# Altium schematic symbol library H_Bridge.SchLib: 2 symbols
Pins are listed as number, name and electrical type; pins without a type are passive.

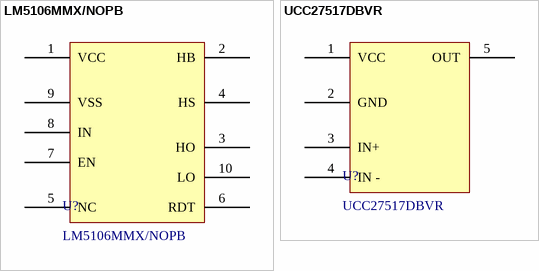
[diagram p0: symbols LM5106MMX/NOPB to UCC27517DBVR]

## LM5106MMX/NOPB
designator U?
Half-Bridge Gate Driver With Programmable Dead-Time; Manufacturer: Texas Instruments; Output Current: 1.8 A; Fall Time: 10 ns; Number of Drivers: 2 Driver; Number of Outputs: 2 Output; Operating Supply Current: 2.1 mA; Propagation Delay - Max: 56 ns; Rise Time: 15 ns; Supply Voltage - Max: 14 V; Supply Voltage - Min: 8 V; ComponentLink1Description: Datasheet; ComponentLink1URL: https://www.lcsc.com/datasheet/C91879.pdf?spm=wm.fly.bg.0.pdf&lcsc_vid=FlkIUABWQVJeAgZfQwdWUlcFT1ZYUV1ST1deUwVWQ1IxVlNfRFRXVVVWTlRaUjsOAxUeFF5JWBYZEEoBGA4JCwFIFA4DSA%3D%3D; LCSC Part #: C91879; Manufacturer Part Number: LM5106MMX/NOPB; Mount: SMD/SMT; Operating Temperature Max: + 125 C; Operating Temperature Min: - 40 C; Package / Case: MSOP-10; Packaging: Tape and Reel; Supplier 1 Part Number: 926-LM5106MMX/NOPB; Supplier 1 URL: https://www.mouser.vn/en/ProductDetail/Texas-Instruments/LM5106MMX-NOPB?qs=QbsRYf82W3H5%252BCCr20AwEg%3D%3D; Supplier 1: Mouser; Supplier 2 Part Number: 296-44277-2-ND; Supplier 2 URL: https://www.digikey.com/en/products/detail/texas-instruments/lm5106mmx-nopb/1871878; Supplier 2: Digi-Key; Supplier 3 Part Number: N/A; Supplier 3 URL: N/A; Supplier 3: thegioiic; Value: LM5106MMX/NOPB; Type: N/A
footprint LM5106MMX/NOPB_MSOP_10 (TSSOP, 10-Leads, Body 3.00x3.00mm, Pitch 0.50mm, IPC Medium Density)
pins: 1 VCC, 2 HB, 3 HO, 4 HS, 5 NC, 6 RDT, 7 EN, 8 IN, 9 VSS, 10 LO

## UCC27517DBVR
designator U?
Single-channel, high-speed, low-side gate driver (with peak source/sink current); Manufacturer: Texas Instruments; Fall Time: 7 ns; Number of Drivers: 1 Driver; Number of Outputs: 1 Output; Output Current: 4 A; Rise Time: 9 ns; Supply Voltage - Max: 18 V; Supply Voltage - Min: 4.5 V; ComponentLink1Description: Datasheet; ComponentLink1URL: https://www.ti.com/lit/ds/symlink/ucc27516.pdf?ts=1793552698157&ref_url=https%253A%252F%252Fgr.mouser.com%252F; LCSC Part #: C99395; Manufacturer Part Number: UCC27517DBVR; Mount: SMD/SMT; Operating Supply Current: N/A; Operating Temperature Max: + 140 C; Operating Temperature Min: - 40 C; Package / Case: SOT-23-5; Packaging: Tape and Reel; Propagation Delay - Max: N/A; Supplier 1 Part Number: 595-UCC27517DBVR; Supplier 1 URL: https://www.mouser.vn/en/ProductDetail/Texas-Instruments/UCC27517DBVR?qs=Brs2XCuyt3cZR2K0W764eA%3D%3D; Supplier 1: Mouser; Supplier 2 Part Number: 296-39527-2-ND; Supplier 2 URL: https://www.digikey.com/en/products/detail/texas-instruments/UCC27517DBVR/3074526; Supplier 2: Digi-Key; Supplier 3 Part Number: N/A; Supplier 3 URL: N/A; Supplier 3: thegioiic; Type: Low Side; Value: UCC27517DBVR
footprint UCC27517DBVR_SOT23_5 (SOT23, 5-Leads, Body 2.90x2.80mm, Pitch 0.95mm, IPC Medium Density)
pins: 1 VCC, 2 GND, 3 IN+, 4 IN -, 5 OUT